# Altium footprint library StandardCase.PcbLib: 209 footprints (part 13 of 14)
Each footprint in its own frame and in the unit in brackets; x right, y up, seen from the top. Pads: shape width x height; smd on the part's side, far side on the other; paste and mask are expansions set on the pad; w line width, h text height; cw(c..) or ccw(c..) is an arc to the next point about the centre after c.
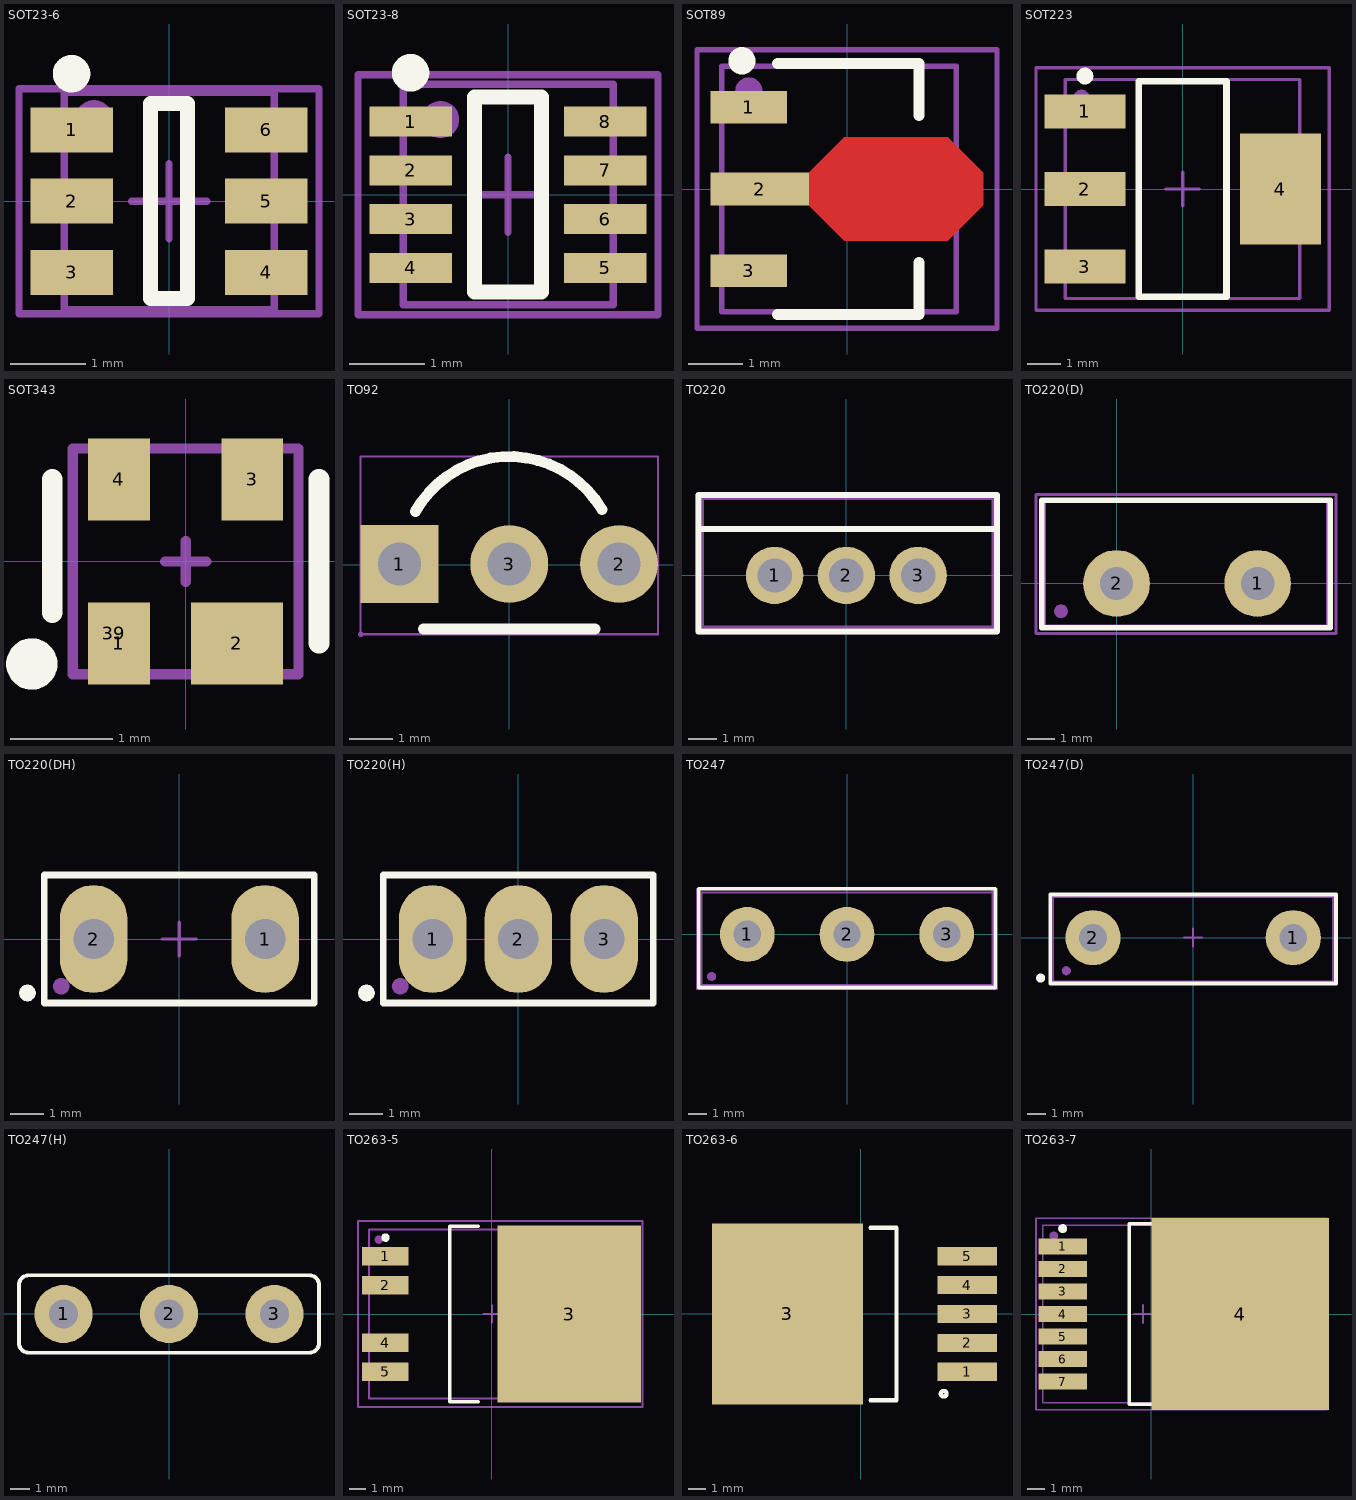
[diagram p12: the footprints below, top view; thin cyan lines are the x and y axes]

## SOT23-6 [mm] "pitch 0.95 mm"
height 1.1
pads (7):
  rect 1.1x0.6 smd: 1(-1.3,0.95) 2(-1.3,0) 3(-1.3,-0.95) 4(1.3,-0.95) 5(1.3,0) 6(1.3,0.95)
  round 0.5 on Mech1: ""(-1,1.1)
Top Overlay:
  circle w0.25: c-1.3,1.7 r0.125
  lines w0.2: -0.25,-1.3 0.25,-1.3 0.25,1.3 -0.25,1.3 -0.25,-1.3
Mechanical 1:
  lines w0.1: -1.4,-1.45 -1.4,1.45 1.4,1.45 1.4,-1.45 -1.4,-1.45
Mechanical 15:
  lines w0.1: -0.5,0 0.5,0 ; 0,-0.5 0,0.5 ; -2,-1.5 -2,1.5 2,1.5 2,-1.5 -2,-1.5
3D body "User Library-SOT23-6-2.STEP": height 1.45, standoff 0, extent -1.4,-1.45 1.4,1.45

## SOT23-8 [mm] "pitch 0.95 mm"
height 1.45
pads (9):
  rect 1.1x0.4 smd: 1(-1.3,0.975) 2(-1.3,0.325) 3(-1.3,-0.325) 4(-1.3,-0.975) 5(1.3,-0.975) 6(1.3,-0.325) 7(1.3,0.325) 8(1.3,0.975)
  round 0.5 on Mech1: ""(-0.9,1)
Top Overlay:
  circle w0.25: c-1.3,1.625 r0.125
  lines w0.2: -0.45,-1.3 0.45,-1.3 0.45,1.3 -0.45,1.3 -0.45,-1.3
Mechanical 1:
  lines w0.1: -1.4,-1.47 1.4,-1.47 1.4,1.47 -1.4,1.47 -1.4,-1.47
Mechanical 15:
  lines w0.1: -0.5,0 0.5,0 ; 0,-0.5 0,0.5 ; -2,-1.6 2,-1.6 2,1.6 -2,1.6 -2,-1.6
3D body "User Library-sot238.STEP": height 1.2, standoff 0, extent -1.4,-1.495 1.4,1.445

## SOT89 [mm]
height 1.6
pads (4):
  rect 1.4x0.6 smd: 1(-1.8,1.5) 3(-1.8,-1.5)
  rect 1.8x0.6 smd: 2(-1.6,0)
  round 0.5 on Mech1: ""(-1.8,1.8)
Top Layer:
  region: -0.7,0.3 -0.05,0.95 1.85,0.95 2.5,0.3 2.5,-0.3 1.85,-0.95 -0.05,-0.95 -0.7,-0.3
  lines w0.2: -1.6,0 2.125,0
Top Overlay:
  circle w0.25: c-1.927,2.35 r0.125
  lines w0.2: -1.278,-2.3 1.322,-2.3 1.322,-1.35 ; -1.278,2.3 1.322,2.3 1.322,1.35
Mechanical 1:
  lines w0.1: -2.3,-2.25 -2.3,2.25 2,2.25 2,-2.25 -2.3,-2.25
Mechanical 15:
  lines w0.1: -0.477,0 0.523,0 ; 0.022,-0.5 0.022,0.5 ; -2.75,-2.55 2.75,-2.55 2.75,2.55 -2.75,2.55 -2.75,-2.55
3D body "SOT-89.step": height 1.51, standoff 0, extent -2.3,-2.25 2,2.25

## SOT223 [mm] "SOT223, 4-Leads, Body 6,50x7,00mm (avg), Pitch 2,30mm, IPC Medium Density"
height 1.8
pads (5):
  rect 2.4x1 smd: 1(-2.9,2.3) 2(-2.9,0) 3(-2.9,-2.3)
  rect 2.4x3.3 smd: 4(2.9,0)
  round 0.5 on Mech1: ""(-3,2.7)
Top Overlay:
  circle w0.25: c-2.9,3.35 r0.125
  lines w0.2: -1.3,-3.2 -1.3,3.2 1.3,3.2 1.3,-3.2 -1.3,-3.2
Mechanical 1:
  lines w0.1: -3.48,-3.25 3.48,-3.25 3.48,3.25 -3.48,3.25 -3.48,-3.25
Mechanical 15:
  lines w0.1: -0.5,0 0.5,0 ; 0,-0.5 0,0.5 ; -4.35,-3.6 -4.35,3.6 4.35,3.6 4.35,-3.6 -4.35,-3.6
3D body "SOT-223-3.step": height 1.65, standoff -0.03, extent -3.48,-3.25 3.48,3.25

## SOT343 [mm]
height 0.9
pads (5):
  rect 0.6x0.8 smd: 1(-0.65,-0.8) 3(0.65,0.8) 4(-0.65,0.8)
  rect 0.9x0.8 smd: 2(0.5,-0.8)
  round 0.5 on Mech1: 39(-0.7,-0.7)
Top Overlay:
  circle w0.25: c-1.5,-1 r0.125
  lines w0.2: -1.3,-0.5 -1.3,0.8 ; 1.3,-0.8 1.3,0.8
Mechanical 1:
  lines w0.1: -1.1,-1.1 -1.1,1.1 1.1,1.1 1.1,-1.1 -1.1,-1.1
Mechanical 15:
  lines w0.1: -0.2,0 0.2,0 ; 0,-0.2 0,0.2 ; -1.1,-1.1 -1.1,1.1 1.1,1.1 1.1,-1.1 -1.1,-1.1
3D body "User Library-SOT343-1.STEP": height 1, standoff 0, extent -1.1,-1.1 1.1,1.1

## TO92 [mm]
pads (3):
  rect 1.8x1.8 hole 1: 1(-2.544,0.02)
  round 1.8 hole 1: 2(2.536,0.02) 3(-0.004,0.02)
Top Overlay:
  lines w0.254: -2.176,1.231 cw(c-0.004,0.02) 2.14,1.28 ; -1.984,-1.48 1.976,-1.48
Mechanical 15:
  region: -2.144,0.02 -2.144,-0.06 -2.205,-0.207 -2.318,-0.319 -2.465,-0.38 -2.624,-0.38 -2.771,-0.319 -2.883,-0.207 -2.944,-0.06 -2.944,0.02 -2.944,0.099 -2.883,0.246 -2.771,0.359 -2.624,0.42 -2.465,0.42 -2.318,0.359 -2.205,0.246 -2.144,0.099
  region: 2.936,0.02 2.936,-0.06 2.875,-0.207 2.762,-0.319 2.615,-0.38 2.456,-0.38 2.309,-0.319 2.197,-0.207 2.136,-0.06 2.136,0.02 2.136,0.099 2.197,0.246 2.309,0.359 2.456,0.42 2.615,0.42 2.762,0.359 2.875,0.246 2.936,0.099
  region: 0.396,0.02 0.396,-0.06 0.335,-0.207 0.222,-0.319 0.075,-0.38 -0.084,-0.38 -0.231,-0.319 -0.343,-0.207 -0.404,-0.06 -0.404,0.02 -0.404,0.099 -0.343,0.246 -0.231,0.359 -0.084,0.42 0.075,0.42 0.222,0.359 0.335,0.246 0.396,0.099
  region: -3.384,-1.607 -3.384,-1.632 -3.419,-1.667 -3.469,-1.667 -3.504,-1.632 -3.504,-1.607 -3.504,-1.582 -3.469,-1.547 -3.419,-1.547 -3.384,-1.582
  lines w0.051: -3.444,-1.607 -3.444,2.506 3.436,2.506 3.436,-1.607 -3.444,-1.607
3D body "ALSRobot-TO-92W.step": height 6.2, standoff -5.1, extent -2.769,-1.53 2.761,2.57

## TO220 [mm]
height 22
pads (3):
  round 2 hole 1.2: 1(-2.5,0) 2(0,0) 3(2.5,0)
Top Overlay:
  lines w0.2: -5.15,1.619 5.247,1.619 ; -5.15,-1.95 5.247,-1.95 5.247,2.8 -5.15,2.8 -5.15,-1.95
Mechanical 1:
  lines w0.1: -5,1.6 5.1,1.6 ; -5,-1.8 -5,2.675 5.1,2.675 5.1,-1.8 -5,-1.8
Mechanical 15:
  lines w0.1: -0.5,0 0.5,0 ; 0,-0.5 0,0.5 ; -5.2,-2 5.247,-2 5.247,2.8 -5.2,2.8 -5.2,-2
3D body "User Library-TO-220-4.STEP": height 22.06, standoff -6.74, extent -5,-1.8 5.2,2.7

## TO220(D) [mm]
pads (3):
  round 2.4 hole 1.2: 1(5.08,0) 2(0,0)
  round 0.5 on Mech1: ""(-2,-1)
Top Overlay:
  lines w0.2: -2.7,-1.6 -2.7,3 7.7,3 7.7,-1.6 -2.7,-1.6
Mechanical 1:
  lines w0.1: -2.59,-1.533 -2.59,2.977 7.59,2.977 7.59,-1.533 -2.59,-1.533
Mechanical 15:
  lines w0.1: -2.9,-1.8 7.9,-1.8 7.9,3.2 -2.9,3.2 -2.9,-1.8
3D body "TO-220FPAC.stp": height 21.15, standoff -8.45, extent -2.59,-1.533 7.59,2.977

## TO220(DH) [mm]
pads (4):
  oval 2x3.2 hole 1.2: 1(2.54,0) 2(-2.54,0)
  round 0.5 on Top Overlay: ""(-4.5,-1.6)
  round 0.5 on Mech1: ""(-3.5,-1.4)
Top Overlay:
  lines w0.2: -4,-1.9 -4,1.9 4,1.9 4,-1.9 -4,-1.9
Mechanical 1:
  lines w0.1: -4,-1.9 4,-1.9 4,1.9 -4,1.9 -4,-1.9
Mechanical 15:
  lines w0.1: -0.5,0 0.5,0 ; 0,-0.5 0,0.5
3D body "TO220-2-90.STEP": height 5.98, standoff -8, extent -5.08,-0.225 5.08,21.665

## TO220(H) [mm]
height 22
pads (5):
  oval 2x3.2 hole 1.2: 1(-2.54,0) 2(0,0) 3(2.54,0)
  round 0.5 on Top Overlay: ""(-4.5,-1.6)
  round 0.5 on Mech1: ""(-3.5,-1.4)
Top Overlay:
  lines w0.2: -4,-1.9 4,-1.9 4,1.9 -4,1.9 -4,-1.9
Mechanical 1:
  lines w0.1: -4,-1.9 -4,1.9 4,1.9 4,-1.9 -4,-1.9
Mechanical 15:
  lines w0.1: -0.5,0 0.5,0 ; 0,-0.5 0,0.5
3D body "TO-220-90.STEP": height 2.76, standoff -7.91, extent -4.95,-0.365 4.95,20.665

## TO247 [mm] "3-Lead Plastic TO-247"
height 20
pads (4):
  round 3 hole 1.5: 1(-5.45,0) 2(0,0) 3(5.45,0)
  round 0.5 on Mech1: ""(-7.4,-2.3)
Top Overlay:
  lines w0.2: -8.1,-2.9 8.1,-2.9 8.1,2.5 -8.1,2.5 -8.1,-2.9
Mechanical 1:
  lines w0.1: -7.95,2.3 7.9,2.3 7.95,2.35 7.95,-2.75 -7.95,-2.75 -7.95,2.3 ; -7.95,2.3 -7.95,2.3
Mechanical 15:
  lines w0.1: -0.5,0 0.5,0 ; 0,-0.5 0,0.5 ; -8.2,-3 -8.2,2.5 8.2,2.5 8.2,-3 -8.2,-3
3D body "TO247_3_21.STEP": height 26.95, standoff -2.47, extent -7.95,-2.75 7.95,2.35

## TO247(D) [mm] "3-Lead Plastic TO-247"
height 20
pads (4):
  round 3 hole 1.5: 1(5.45,0) 2(-5.45,0)
  round 0.5 on Top Overlay: ""(-8.3,-2.2)
  round 0.5 on Mech1: ""(-6.9,-1.8)
Top Overlay:
  lines w0.2: -7.775,-2.5 -7.775,2.35 7.775,2.35 7.775,-2.5 -7.775,-2.5
Mechanical 1:
  lines w0.1: -7.62,-2.386 -7.62,2.211 7.62,2.211 7.62,-2.386 -7.62,-2.386
Mechanical 15:
  lines w0.1: -0.5,0 0.5,0 ; 0,-0.5 0,0.5 ; -7.775,-2.5 7.775,-2.5 7.775,2.35 -7.775,2.35 -7.775,-2.5
3D body "User Library-TO-247-2_PIN.STEP": height 25.33, standoff -10.73, extent -7.62,-2.386 7.62,2.211

## TO247(H) [mm] "3-Lead Plastic TO-247"
height 20
pads (3):
  round 3 hole 1.5: 1(-5.45,0) 2(0,0) 3(5.45,0)
Top Overlay:
  lines w0.2: -7.75,-1.5 ccw(c-7.25,-1.5) -7.25,-2 7.25,-2 ccw(c7.25,-1.5) 7.75,-1.5 7.75,1.5 ccw(c7.25,1.5) 7.25,2 -7.25,2 ccw(c-7.25,1.5) -7.75,1.5 -7.75,-1.5
Mechanical 1:
  lines w0.1: -7.75,-1.5 ccw(c-7.25,-1.5) -7.25,-2 7.25,-2 ccw(c7.25,-1.5) 7.75,-1.5 7.75,1.5 ccw(c7.25,1.5) 7.25,2 -7.25,2 ccw(c-7.25,1.5) -7.75,1.5 -7.75,-1.5
Mechanical 15:
  lines w0.1: -0.5,0 0.5,0 ; 0,-0.5 0,0.5 ; -7.75,-1.5 ccw(c-7.25,-1.5) -7.25,-2 7.25,-2 ccw(c7.25,-1.5) 7.75,-1.5 7.75,1.5 ccw(c7.25,1.5) 7.25,2 -7.25,2 ccw(c-7.25,1.5) -7.75,1.5 -7.75,-1.5
3D body "User Library-TO-247H.STEP": height 3.9, standoff -8, extent -7.75,-0.3 7.75,28.1

## TO263-5 [mm]
height 4.65
pads (6):
  rect 2.75x1.1 smd: 1(-6.3,3.42) 2(-6.3,1.71) 4(-6.3,-1.71) 5(-6.3,-3.42)
  rect 8.5x10.5 smd: 3(4.572,0)
  round 0.5 on Mech1: ""(-6.7,4.4)
Top Overlay:
  circle w0.25: c-6.3,4.52 r0.125
  lines w0.2: -0.8,-5.2 -2.5,-5.2 -2.5,5.2 -0.8,5.2
Mechanical 1:
  lines w0.1: -7.276,-5 -7.276,5 8.394,5 8.394,-5 -7.276,-5
Mechanical 15:
  lines w0.1: -0.5,0 0.5,0 ; 0,-0.5 0,0.5 ; -7.925,-5.5 8.9,-5.5 8.9,5.5 -7.925,5.5 -7.925,-5.5
3D body "TO263-5S.STEP": height 4.93, standoff 0.13, extent -7.276,-5 8.394,5

## TO263-6 [mm]
pads (6):
  rect 3.5x1.069 smd: 1(6.274,-3.41) 2(6.274,-1.708) 3(6.274,-0.006) 4(6.274,1.696) 5(6.274,3.398)
  rect 8.89x10.66 smd: 3(-4.326,-0.006)
Top Overlay:
  circle w0.254: c4.881,-4.705 r0.165
  lines w0.254: 0.563,-5.086 2.1,-5.086 2.1,5.074 0.563,5.074
Mechanical 15:
  lines w0.003: -0.399,0.46 -0.348,0.51
3D body "D2PAK TO-263-5.step": height 4.87, standoff 0, extent -7.43,-5.08 6.8,5.08

## TO263-7 [mm] "TO263-7 (D2Pak, 7-Pads)"
height 4.6
pads (9):
  rect 2.75x0.89 smd paste+0: 1(-5,3.81) 4(-5,0)
  rect 2.75x0.89 smd: 2(-5,2.54) 3(-5,1.27) 5(-5,-1.27) 6(-5,-2.54) 7(-5,-3.81)
  rect 10x10.8 smd: 4(5,0)
  round 0.5 on Mech1: ""(-5.5,4.4)
Top Overlay:
  circle w0.25: c-5,4.81 r0.125
  lines w0.2: 0.923,-5.08 -1.25,-5.08 -1.25,5.08 0.93,5.08
Mechanical 1:
  lines w0.1: -6.117,-5 9.553,-5 9.553,5 -6.117,5 -6.117,-5
Mechanical 15:
  lines w0.1: -0.974,0 0.026,0 ; -0.472,-0.5 -0.472,0.5 ; -6.502,-5.4 9.9,-5.4 9.9,5.4 -6.498,5.4 -6.502,-5.4
3D body "TO263-7-1.STEP": height 4.83, standoff 0.03, extent -6.117,-5 9.553,5